# Altium footprint library Package_DFN_QFN.PcbLib: 735 footprints (part 28 of 46)
Each footprint in its own frame and in the unit in brackets; x right, y up, seen from the top. Pads: shape width x height; smd on the part's side, far side on the other; paste and mask are expansions set on the pad; w line width, h text height; cw(c..) or ccw(c..) is an arc to the next point about the centre after c.
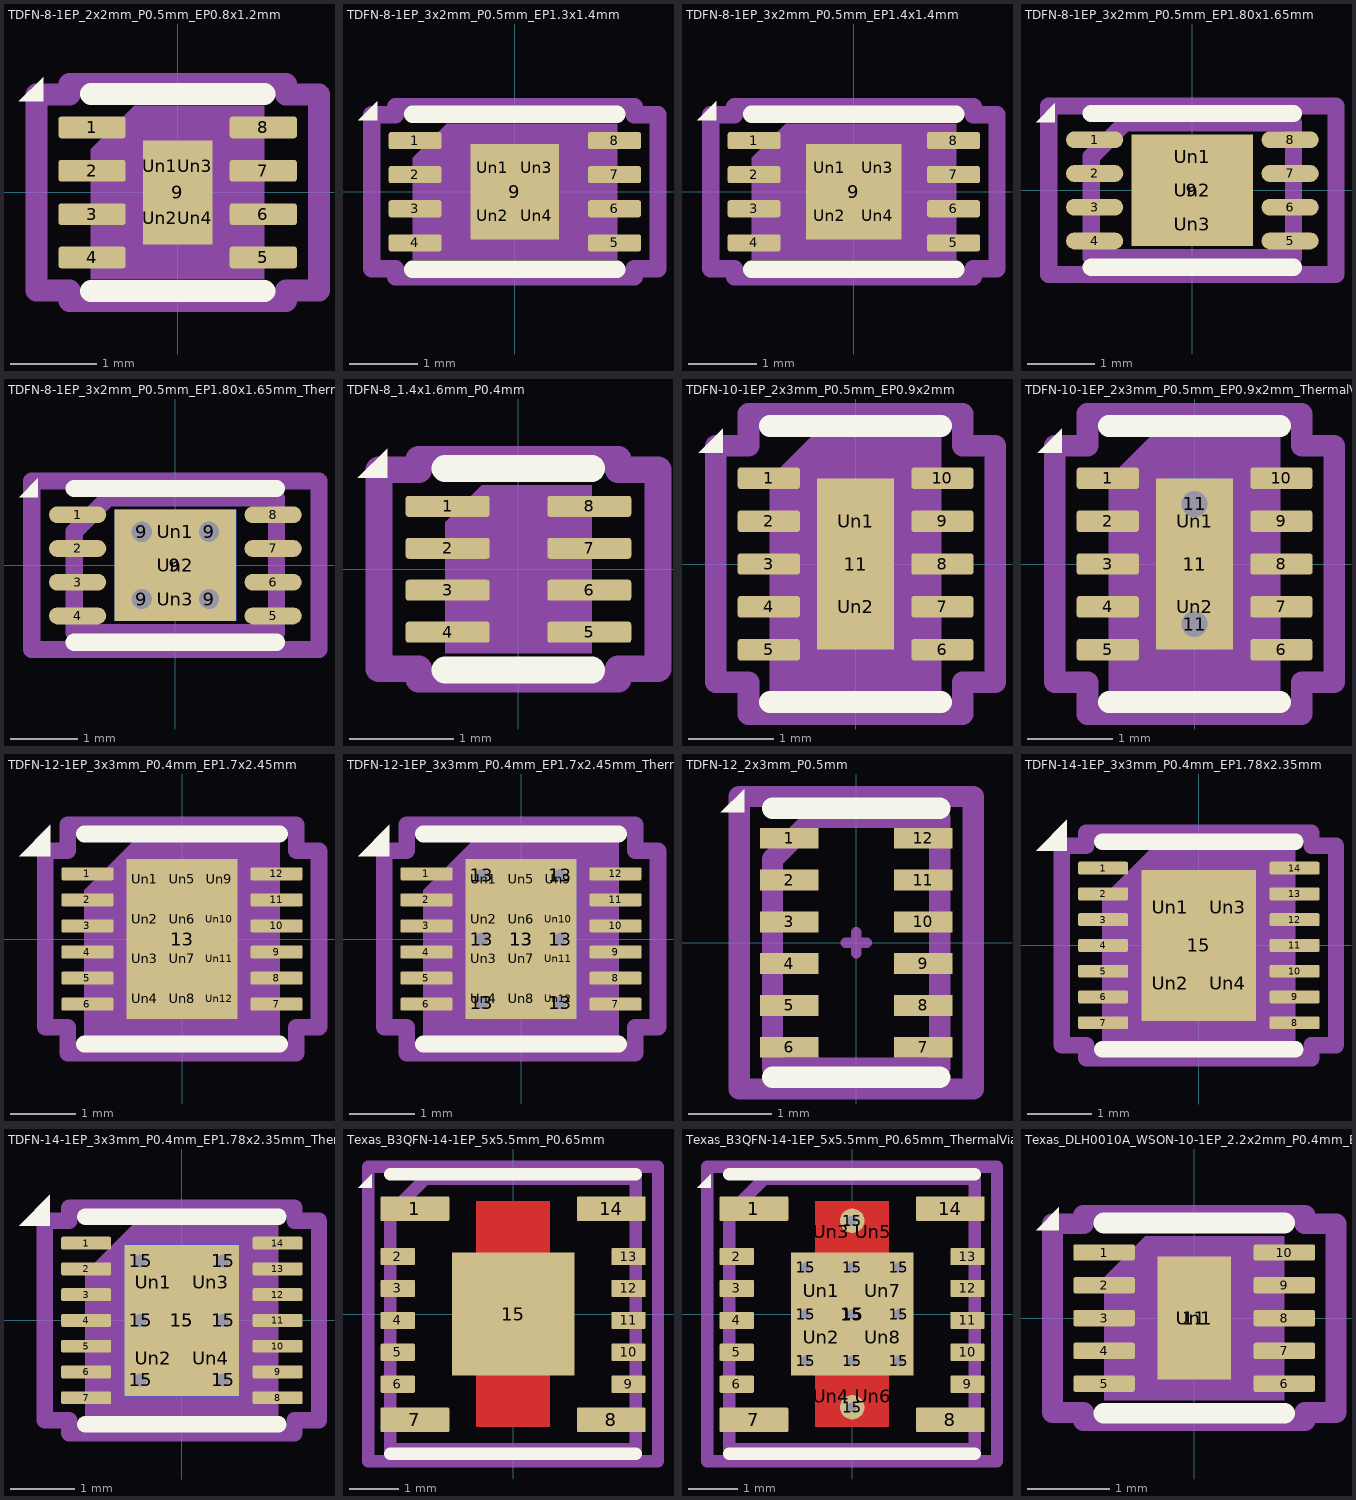
[diagram p27: the footprints below, top view; thin cyan lines are the x and y axes]

## TDFN-8-1EP_2x2mm_P0.5mm_EP0.8x1.2mm [mm] "TDFN-8-1EP_2x2mm_P0.5mm_EP0.8x1.2mm"
pads (13):
  rrect25% 0.775x0.25 smd: 1(-0.988,0.75) 2(-0.988,0.25) 3(-0.988,-0.25) 4(-0.988,-0.75) 5(0.988,-0.75) 6(0.988,-0.25) 7(0.988,0.25) 8(0.988,0.75)
  rect 0.8x1.2 smd: 9(0,0)
  rrect25% 0.32x0.48 on Top Paste: Un1(-0.2,0.3) Un2(-0.2,-0.3) Un3(0.2,0.3) Un4(0.2,-0.3)
F.SilkS:
  region: -1.55,1.05 -1.83,1.05 -1.55,1.33
  lines w0.254: -1,-1.135 1,-1.135 ; -1,1.135 1,1.135
Top Component Center:
  lines w0.127: -0.127,0 0.127,0 -0.127,0 ; 0,-0.127 0,0.127 0,-0.127
Top Assembly:
  region: 1,-1 -1,-1 -1,0.5 -0.5,1 1,1
Top Courtyard:
  lines w0.254: -1.63,-1.13 -1.63,1.13 -1.25,1.13 -1.25,1.25 1.25,1.25 1.25,1.13 1.63,1.13 1.63,-1.13 1.25,-1.13 1.25,-1.25 -1.25,-1.25 -1.25,-1.13 -1.63,-1.13
Top Designator:
  text ".Designator" at -2.251,-0.226 h1

## TDFN-8-1EP_3x2mm_P0.5mm_EP1.3x1.4mm [mm] "TDFN-8-1EP_3x2mm_P0.5mm_EP1.3x1.4mm"
pads (13):
  rrect25% 0.775x0.25 smd: 1(-1.462,0.75) 2(-1.462,0.25) 3(-1.462,-0.25) 4(-1.462,-0.75) 5(1.462,-0.75) 6(1.462,-0.25) 7(1.462,0.25) 8(1.462,0.75)
  rect 1.3x1.4 smd: 9(0,0)
  rrect25% 0.52x0.56 on Top Paste: Un1(-0.325,0.35) Un2(-0.325,-0.35) Un3(0.325,0.35) Un4(0.325,-0.35)
F.SilkS:
  region: -2.02,1.05 -2.3,1.05 -2.02,1.33
  lines w0.254: -1.5,-1.135 1.5,-1.135 ; -1.5,1.135 1.5,1.135
Top Component Center:
  lines w0.127: -0.127,0 0.127,0 -0.127,0 ; 0,-0.127 0,0.127 0,-0.127
Top Assembly:
  region: 1.5,-1 -1.5,-1 -1.5,0.5 -1,1 1.5,1
Top Courtyard:
  lines w0.254: -2.1,-1.13 -2.1,1.13 -1.75,1.13 -1.75,1.25 1.75,1.25 1.75,1.13 2.1,1.13 2.1,-1.13 1.75,-1.13 1.75,-1.25 -1.75,-1.25 -1.75,-1.13 -2.1,-1.13
Top Designator:
  text ".Designator" at -3.43,-0.344 h1.52

## TDFN-8-1EP_3x2mm_P0.5mm_EP1.4x1.4mm [mm] "TDFN-8-1EP_3x2mm_P0.5mm_EP1.4x1.4mm"
pads (13):
  rrect25% 0.775x0.25 smd: 1(-1.462,0.75) 2(-1.462,0.25) 3(-1.462,-0.25) 4(-1.462,-0.75) 5(1.462,-0.75) 6(1.462,-0.25) 7(1.462,0.25) 8(1.462,0.75)
  rect 1.4x1.4 smd: 9(0,0)
  rrect25% 0.56x0.56 on Top Paste: Un1(-0.35,0.35) Un2(-0.35,-0.35) Un3(0.35,0.35) Un4(0.35,-0.35)
F.SilkS:
  region: -2.02,1.05 -2.3,1.05 -2.02,1.33
  lines w0.254: -1.5,-1.135 1.5,-1.135 ; -1.5,1.135 1.5,1.135
Top Component Center:
  lines w0.127: -0.127,0 0.127,0 -0.127,0 ; 0,-0.127 0,0.127 0,-0.127
Top Assembly:
  region: 1.5,-1 -1.5,-1 -1.5,0.5 -1,1 1.5,1
Top Courtyard:
  lines w0.254: -2.1,-1.13 -1.75,-1.13 -1.75,-1.25 1.75,-1.25 1.75,-1.13 2.1,-1.13 2.1,1.13 1.75,1.13 1.75,1.25 -1.75,1.25 -1.75,1.13 -2.1,1.13 -2.1,-1.13
Top Designator:
  text ".Designator" at -3.43,-0.344 h1.52

## TDFN-8-1EP_3x2mm_P0.5mm_EP1.80x1.65mm [mm] "TDFN-8-1EP_3x2mm_P0.5mm_EP1.80x1.65mm"
pads (12):
  rrect100% 0.85x0.25 smd: 1(-1.45,0.75) 2(-1.45,0.25) 3(-1.45,-0.25) 4(-1.45,-0.75) 5(1.45,-0.75) 6(1.45,-0.25) 7(1.45,0.25) 8(1.45,0.75)
  rect 1.8x1.65 smd: 9(0,0)
  rect 0.7x0.65 on Top Paste: Un1(0,0.5) Un3(0,-0.5)
  rect 1.8x0.7 on Top Paste: Un2(0,0)
F.SilkS:
  region: -2.04,1.01 -2.32,1.01 -2.04,1.29
  lines w0.254: -1.5,-1.14 1.5,-1.14 ; -1.5,1.14 1.5,1.14
Top Component Center:
  lines w0.127: -0.127,0 0.127,0 -0.127,0 ; 0,-0.127 0,0.127 0,-0.127
Top Assembly:
  lines w0.254: -1.5,-1 1.5,-1 1.5,1 -1,1 -1.5,0.5 -1.5,-1
Top Courtyard:
  lines w0.254: -2.13,-1.25 2.13,-1.25 2.13,1.25 -2.13,1.25 -2.13,-1.25
Top Designator:
  text ".Designator" at -3.43,-0.344 h1.52

## TDFN-8-1EP_3x2mm_P0.5mm_EP1.80x1.65mm_ThermalVias [mm] "TDFN-8-1EP_3x2mm_P0.5mm_EP1.80x1.65mm_ThermalVias"
pads (17):
  rrect100% 0.85x0.25 smd: 1(-1.45,0.75) 2(-1.45,0.25) 3(-1.45,-0.25) 4(-1.45,-0.75) 5(1.45,-0.75) 6(1.45,-0.25) 7(1.45,0.25) 8(1.45,0.75)
  round 0.65 hole 0.3: 9(-0.5,-0.5) 9(-0.5,0.5) 9(0.5,-0.5) 9(0.5,0.5)
  rect 1.8x1.65 smd: 9(0,0)
  rect 1.8x1.65 smd far side: 9(0,0)
  rect 0.7x0.65 on Top Paste: Un1(0,0.5) Un3(0,-0.5)
  rect 1.8x0.7 on Top Paste: Un2(0,0)
F.SilkS:
  region: -2.04,1.01 -2.32,1.01 -2.04,1.29
  lines w0.254: -1.5,-1.14 1.5,-1.14 ; -1.5,1.14 1.5,1.14
Top Component Center:
  lines w0.127: -0.127,0 0.127,0 -0.127,0 ; 0,-0.127 0,0.127 0,-0.127
Top Assembly:
  lines w0.254: -1.5,-1 1.5,-1 1.5,1 -1,1 -1.5,0.5 -1.5,-1
Top Courtyard:
  lines w0.254: -2.13,-1.25 2.13,-1.25 2.13,1.25 -2.13,1.25 -2.13,-1.25
Top Designator:
  text ".Designator" at -3.43,-0.344 h1.52

## TDFN-8_1.4x1.6mm_P0.4mm [mm] "TDFN-8_1.4x1.6mm_P0.4mm"
pads (8):
  rrect25% 0.8x0.2 smd: 1(-0.675,0.6) 2(-0.675,0.2) 3(-0.675,-0.2) 4(-0.675,-0.6) 5(0.675,-0.6) 6(0.675,-0.2) 7(0.675,0.2) 8(0.675,0.6)
F.SilkS:
  region: -1.25,0.87 -1.53,0.87 -1.25,1.15
  lines w0.254: -0.7,-0.96 0.7,-0.96 ; -0.7,0.96 0.7,0.96
Top Component Center:
  lines w0.127: -0.127,0 0.127,0 -0.127,0 ; 0,-0.127 0,0.127 0,-0.127
Top Assembly:
  region: 0.7,-0.8 -0.7,-0.8 -0.7,0.45 -0.35,0.8 0.7,0.8
Top Courtyard:
  lines w0.254: -1.33,-0.95 -0.95,-0.95 -0.95,-1.05 0.95,-1.05 0.95,-0.95 1.33,-0.95 1.33,0.95 0.95,0.95 0.95,1.05 -0.95,1.05 -0.95,0.95 -1.33,0.95 -1.33,-0.95
Top Designator:
  text ".Designator" at -2.251,-0.226 h1
3D body "TDFN-8_1.4x1.6mm_P0.4mm.step": height 0.39, standoff 0, extent -0.79,-0.7 0.79,0.7

## TDFN-10-1EP_2x3mm_P0.5mm_EP0.9x2mm [mm] "TDFN-10-1EP_2x3mm_P0.5mm_EP0.9x2mm"
pads (13):
  rrect25% 0.725x0.25 smd: 1(-1.012,1) 2(-1.012,0.5) 3(-1.012,0) 4(-1.012,-0.5) 5(-1.012,-1) 6(1.012,-1) 7(1.012,-0.5) 8(1.012,0) 9(1.012,0.5) 10(1.012,1)
  rect 0.9x2 smd: 11(0,0)
  rrect25% 0.73x0.81 on Top Paste: Un1(0,0.5) Un2(0,-0.5)
F.SilkS:
  region: -1.55,1.3 -1.83,1.3 -1.55,1.58
  lines w0.254: -1,-1.61 1,-1.61 ; -1,1.61 1,1.61
Top Component Center:
  lines w0.127: -0.127,0 0.127,0 -0.127,0 ; 0,-0.127 0,0.127 0,-0.127
Top Assembly:
  region: 1,-1.5 -1,-1.5 -1,1 -0.5,1.5 1,1.5
Top Courtyard:
  lines w0.254: -1.63,-1.38 -1.25,-1.38 -1.25,-1.75 1.25,-1.75 1.25,-1.38 1.63,-1.38 1.63,1.38 1.25,1.38 1.25,1.75 -1.25,1.75 -1.25,1.38 -1.63,1.38 -1.63,-1.38
Top Designator:
  text ".Designator" at -2.251,-0.226 h1

## TDFN-10-1EP_2x3mm_P0.5mm_EP0.9x2mm_ThermalVias [mm] "TDFN-10-1EP_2x3mm_P0.5mm_EP0.9x2mm_ThermalVias"
pads (16):
  rrect25% 0.725x0.25 smd: 1(-1.012,1) 2(-1.012,0.5) 3(-1.012,0) 4(-1.012,-0.5) 5(-1.012,-1) 6(1.012,-1) 7(1.012,-0.5) 8(1.012,0) 9(1.012,0.5) 10(1.012,1)
  round 0.6 hole 0.3: 11(0,-0.7) 11(0,0.7)
  rect 0.9x2 smd: 11(0,0)
  rect 0.6x2 smd far side: 11(0,0)
  rrect25% 0.73x0.81 on Top Paste: Un1(0,0.5) Un2(0,-0.5)
F.SilkS:
  region: -1.55,1.3 -1.83,1.3 -1.55,1.58
  lines w0.254: -1,-1.61 1,-1.61 ; -1,1.61 1,1.61
Top Component Center:
  lines w0.127: -0.127,0 0.127,0 -0.127,0 ; 0,-0.127 0,0.127 0,-0.127
Top Assembly:
  region: 1,-1.5 -1,-1.5 -1,1 -0.5,1.5 1,1.5
Top Courtyard:
  lines w0.254: -1.63,-1.38 -1.25,-1.38 -1.25,-1.75 1.25,-1.75 1.25,-1.38 1.63,-1.38 1.63,1.38 1.25,1.38 1.25,1.75 -1.25,1.75 -1.25,1.38 -1.63,1.38 -1.63,-1.38
Top Designator:
  text ".Designator" at -2.251,-0.226 h1

## TDFN-12-1EP_3x3mm_P0.4mm_EP1.7x2.45mm [mm] "TDFN-12-1EP_3x3mm_P0.4mm_EP1.7x2.45mm"
pads (25):
  rrect25% 0.8x0.2 smd: 1(-1.45,1) 2(-1.45,0.6) 3(-1.45,0.2) 4(-1.45,-0.2) 5(-1.45,-0.6) 6(-1.45,-1) 7(1.45,-1) 8(1.45,-0.6) 9(1.45,-0.2) 10(1.45,0.2) 11(1.45,0.6) 12(1.45,1)
  rect 1.7x2.45 smd: 13(0,0)
  rrect25% 0.46x0.49 on Top Paste: Un1(-0.57,0.915) Un2(-0.57,0.305) Un3(-0.57,-0.305) Un4(-0.57,-0.915) Un5(0,0.915) Un6(0,0.305) Un7(0,-0.305) Un8(0,-0.915) Un9(0.57,0.915) Un10(0.57,0.305) Un11(0.57,-0.305) Un12(0.57,-0.915)
F.SilkS:
  region: -2.02,1.27 -2.5,1.27 -2.02,1.75
  lines w0.254: -1.5,-1.61 1.5,-1.61 ; -1.5,1.61 1.5,1.61
Top Component Center:
  lines w0.127: -0.127,0 0.127,0 -0.127,0 ; 0,-0.127 0,0.127 0,-0.127
Top Assembly:
  region: 1.5,-1.5 -1.5,-1.5 -1.5,0.75 -0.75,1.5 1.5,1.5
Top Courtyard:
  lines w0.254: -2.1,-1.35 -1.75,-1.35 -1.75,-1.75 1.75,-1.75 1.75,-1.35 2.1,-1.35 2.1,1.35 1.75,1.35 1.75,1.75 -1.75,1.75 -1.75,1.35 -2.1,1.35 -2.1,-1.35
Top Designator:
  text ".Designator" at -3.43,-0.344 h1.52

## TDFN-12-1EP_3x3mm_P0.4mm_EP1.7x2.45mm_ThermalVias [mm] "TDFN-12-1EP_3x3mm_P0.4mm_EP1.7x2.45mm_ThermalVias"
pads (32):
  rrect25% 0.8x0.2 smd: 1(-1.45,1) 2(-1.45,0.6) 3(-1.45,0.2) 4(-1.45,-0.2) 5(-1.45,-0.6) 6(-1.45,-1) 7(1.45,-1) 8(1.45,-0.6) 9(1.45,-0.2) 10(1.45,0.2) 11(1.45,0.6) 12(1.45,1)
  round 0.5 hole 0.2: 13(-0.6,-0.975) 13(-0.6,0) 13(-0.6,0.975) 13(0.6,-0.975) 13(0.6,0) 13(0.6,0.975)
  rect 1.7x2.45 smd: 13(0,0)
  rect 1.7x2.45 smd far side: 13(0,0)
  rrect25% 0.46x0.49 on Top Paste: Un1(-0.57,0.915) Un2(-0.57,0.305) Un3(-0.57,-0.305) Un4(-0.57,-0.915) Un5(0,0.915) Un6(0,0.305) Un7(0,-0.305) Un8(0,-0.915) Un9(0.57,0.915) Un10(0.57,0.305) Un11(0.57,-0.305) Un12(0.57,-0.915)
F.SilkS:
  region: -2.02,1.27 -2.5,1.27 -2.02,1.75
  lines w0.254: -1.5,-1.61 1.5,-1.61 ; -1.5,1.61 1.5,1.61
Top Component Center:
  lines w0.127: -0.127,0 0.127,0 -0.127,0 ; 0,-0.127 0,0.127 0,-0.127
Top Assembly:
  region: 1.5,-1.5 -1.5,-1.5 -1.5,0.75 -0.75,1.5 1.5,1.5
Top Courtyard:
  lines w0.254: -2.1,-1.35 -2.1,1.35 -1.75,1.35 -1.75,1.75 1.75,1.75 1.75,1.35 2.1,1.35 2.1,-1.35 1.75,-1.35 1.75,-1.75 -1.75,-1.75 -1.75,-1.35 -2.1,-1.35
Top Designator:
  text ".Designator" at -3.43,-0.344 h1.52

## TDFN-12_2x3mm_P0.5mm [mm] "TDFN-12_2x3mm_P0.5mm"
pads (12):
  rect 0.7x0.25 smd: 1(-0.8,1.25) 2(-0.8,0.75) 3(-0.8,0.25) 4(-0.8,-0.25) 5(-0.8,-0.75) 6(-0.8,-1.25) 7(0.8,-1.25) 8(0.8,-0.75) 9(0.8,-0.25) 10(0.8,0.25) 11(0.8,0.75) 12(0.8,1.25)
F.SilkS:
  region: -1.34,1.56 -1.62,1.56 -1.34,1.84
  lines w0.254: -1,-1.61 1,-1.61 ; -1,1.61 1,1.61
Top Component Center:
  lines w0.127: -0.127,0 0.127,0 -0.127,0 ; 0,-0.127 0,0.127 0,-0.127
Top Assembly:
  lines w0.254: -1,-1.5 1,-1.5 1,1.5 -0.5,1.5 -1,1 -1,-1.5
Top Courtyard:
  lines w0.254: -1.4,-1.75 1.4,-1.75 1.4,1.75 -1.4,1.75 -1.4,-1.75
Top Designator:
  text ".Designator" at -3.43,-0.344 h1.52

## TDFN-14-1EP_3x3mm_P0.4mm_EP1.78x2.35mm [mm] "TDFN-14-1EP_3x3mm_P0.4mm_EP1.78x2.35mm"
pads (19):
  rrect25% 0.775x0.2 smd: 1(-1.488,1.2) 2(-1.488,0.8) 3(-1.488,0.4) 4(-1.488,0) 5(-1.488,-0.4) 6(-1.488,-0.8) 7(-1.488,-1.2) 8(1.488,-1.2) 9(1.488,-0.8) 10(1.488,-0.4) 11(1.488,0) 12(1.488,0.4) 13(1.488,0.8) 14(1.488,1.2)
  rect 1.78x2.35 smd: 15(0,0)
  rrect25% 0.72x0.95 on Top Paste: Un1(-0.445,0.59) Un2(-0.445,-0.59) Un3(0.445,0.59) Un4(0.445,-0.59)
F.SilkS:
  region: -2.05,1.47 -2.53,1.47 -2.05,1.95
  lines w0.254: -1.5,-1.61 1.5,-1.61 ; -1.5,1.61 1.5,1.61
Top Component Center:
  lines w0.127: -0.127,0 0.127,0 -0.127,0 ; 0,-0.127 0,0.127 0,-0.127
Top Assembly:
  region: 1.5,-1.5 -1.5,-1.5 -1.5,0.75 -0.75,1.5 1.5,1.5
Top Courtyard:
  lines w0.254: -2.13,-1.55 -1.75,-1.55 -1.75,-1.75 1.75,-1.75 1.75,-1.55 2.13,-1.55 2.13,1.55 1.75,1.55 1.75,1.75 -1.75,1.75 -1.75,1.55 -2.13,1.55 -2.13,-1.55
Top Designator:
  text ".Designator" at -3.43,-0.344 h1.52

## TDFN-14-1EP_3x3mm_P0.4mm_EP1.78x2.35mm_ThermalVias [mm] "TDFN-14-1EP_3x3mm_P0.4mm_EP1.78x2.35mm_ThermalVias"
pads (26):
  rrect25% 0.775x0.2 smd: 1(-1.488,1.2) 2(-1.488,0.8) 3(-1.488,0.4) 4(-1.488,0) 5(-1.488,-0.4) 6(-1.488,-0.8) 7(-1.488,-1.2) 8(1.488,-1.2) 9(1.488,-0.8) 10(1.488,-0.4) 11(1.488,0) 12(1.488,0.4) 13(1.488,0.8) 14(1.488,1.2)
  round 0.5 hole 0.2: 15(-0.64,-0.925) 15(-0.64,0) 15(-0.64,0.925) 15(0.64,-0.925) 15(0.64,0) 15(0.64,0.925)
  rect 1.78x2.35 smd: 15(0,0)
  rect 1.78x2.35 smd far side: 15(0,0)
  rrect25% 0.77x1.02 on Top Paste: Un1(-0.445,0.59) Un2(-0.445,-0.59) Un3(0.445,0.59) Un4(0.445,-0.59)
F.SilkS:
  region: -2.05,1.47 -2.53,1.47 -2.05,1.95
  lines w0.254: -1.5,-1.61 1.5,-1.61 ; -1.5,1.61 1.5,1.61
Top Component Center:
  lines w0.127: -0.127,0 0.127,0 -0.127,0 ; 0,-0.127 0,0.127 0,-0.127
Top Assembly:
  region: 1.5,-1.5 -1.5,-1.5 -1.5,0.75 -0.75,1.5 1.5,1.5
Top Courtyard:
  lines w0.254: -2.13,-1.55 -1.75,-1.55 -1.75,-1.75 1.75,-1.75 1.75,-1.55 2.13,-1.55 2.13,1.55 1.75,1.55 1.75,1.75 -1.75,1.75 -1.75,1.55 -2.13,1.55 -2.13,-1.55
Top Designator:
  text ".Designator" at -3.43,-0.344 h1.52

## Texas_B3QFN-14-1EP_5x5.5mm_P0.65mm [mm] "Texas_B3QFN-14-1EP_5x5.5mm_P0.65mm"
pads (15):
  rrect10% 1.4x0.5 smd: 1(-2,2.145) 7(-2,-2.155) 8(2,-2.155) 14(2,2.145)
  rrect14% 0.7x0.35 smd: 2(-2.35,1.17) 3(-2.35,0.52) 4(-2.35,-0.13) 5(-2.35,-0.78) 6(-2.35,-1.43) 9(2.35,-1.43) 10(2.35,-0.78) 11(2.35,-0.13) 12(2.35,0.52) 13(2.35,1.17)
  rect 2.5x2.5 smd: 15(0,0)
F.Cu:
  region: 0.75,-2.3 -0.75,-2.3 -0.75,-1.25 0.75,-1.25
  region: 0.75,1.25 -0.75,1.25 -0.75,2.3 0.75,2.3
F.SilkS:
  region: -2.88,2.57 -3.16,2.57 -2.88,2.85
  lines w0.254: -2.5,-2.85 2.5,-2.85 ; -2.5,2.85 2.5,2.85
F.Paste:
  region: 0.75,-2.3 -0.75,-2.3 -0.75,-1.25 0.75,-1.25
  region: 0.75,1.25 -0.75,1.25 -0.75,2.3 0.75,2.3
F.Mask:
  region: 0.75,-2.3 -0.75,-2.3 -0.75,-1.25 0.75,-1.25
  region: 0.75,1.25 -0.75,1.25 -0.75,2.3 0.75,2.3
Top Component Center:
  lines w0.127: -0.127,0 0.127,0 -0.127,0 ; 0,-0.127 0,0.127 0,-0.127
Top Assembly:
  lines w0.254: -2.5,-2.75 2.5,-2.75 2.5,2.75 -1.8,2.75 -2.5,2.05 -2.5,-2.75
Top Courtyard:
  lines w0.254: -2.95,-3 2.95,-3 2.95,3 -2.95,3 -2.95,-3
Top Designator:
  text ".Designator" at -3.43,-0.344 h1.52

## Texas_B3QFN-14-1EP_5x5.5mm_P0.65mm_ThermalVia [mm] "Texas_B3QFN-14-1EP_5x5.5mm_P0.65mm_ThermalVia"
pads (34):
  rrect10% 1.4x0.5 smd: 1(-2,2.145) 7(-2,-2.155) 8(2,-2.155) 14(2,2.145)
  rrect14% 0.7x0.35 smd: 2(-2.35,1.17) 3(-2.35,0.52) 4(-2.35,-0.13) 5(-2.35,-0.78) 6(-2.35,-1.43) 9(2.35,-1.43) 10(2.35,-0.78) 11(2.35,-0.13) 12(2.35,0.52) 13(2.35,1.17)
  round 0.5 hole 0.2: 15(-0.95,-0.95) 15(-0.95,0) 15(-0.95,0.95) 15(0,-1.9) 15(0,-0.95) 15(0,0) 15(0,0.95) 15(0,1.9) 15(0.95,-0.95) 15(0.95,0) 15(0.95,0.95)
  rect 2.5x2.5 smd: 15(0,0)
  rrect8% 0.95x0.65 on Top Paste: Un1(-0.625,0.475) Un2(-0.625,-0.475) Un7(0.625,0.475) Un8(0.625,-0.475)
  rrect8% 0.6x1.15 on Top Paste: Un3(-0.425,1.675) Un4(-0.425,-1.675) Un5(0.425,1.675) Un6(0.425,-1.675)
F.Cu:
  region: 0.75,-2.3 -0.75,-2.3 -0.75,-1.25 0.75,-1.25
  region: 0.75,1.25 -0.75,1.25 -0.75,2.3 0.75,2.3
F.SilkS:
  region: -2.88,2.57 -3.16,2.57 -2.88,2.85
  lines w0.254: -2.5,-2.85 2.5,-2.85 ; -2.5,2.85 2.5,2.85
F.Mask:
  region: 0.75,-2.3 -0.75,-2.3 -0.75,-1.25 0.75,-1.25
  region: 0.75,1.25 -0.75,1.25 -0.75,2.3 0.75,2.3
Top Component Center:
  lines w0.127: -0.127,0 0.127,0 -0.127,0 ; 0,-0.127 0,0.127 0,-0.127
Top Assembly:
  lines w0.254: -2.5,-2.75 2.5,-2.75 2.5,2.75 -1.8,2.75 -2.5,2.05 -2.5,-2.75
Top Courtyard:
  lines w0.254: -2.95,-3 2.95,-3 2.95,3 -2.95,3 -2.95,-3
Top Designator:
  text ".Designator" at -3.43,-0.344 h1.52

## Texas_DLH0010A_WSON-10-1EP_2.2x2mm_P0.4mm_EP0.9x1.5mm [mm] "Texas_DLH0010A_WSON-10-1EP_2.2x2mm_P0.4mm_EP0.9x1.5mm"
pads (12):
  rrect25% 0.75x0.2 smd: 1(-1.1,0.8) 2(-1.1,0.4) 3(-1.1,0) 4(-1.1,-0.4) 5(-1.1,-0.8) 6(1.1,-0.8) 7(1.1,-0.4) 8(1.1,0) 9(1.1,0.4) 10(1.1,0.8)
  rect 0.9x1.5 smd: 11(0,0)
  rrect25% 0.84x1.41 on Top Paste: Un1(0,0)
F.SilkS:
  region: -1.65,1.07 -1.93,1.07 -1.65,1.35
  lines w0.254: -1.1,-1.16 1.1,-1.16 ; -1.1,1.16 1.1,1.16
Top Component Center:
  lines w0.127: -0.127,0 0.127,0 -0.127,0 ; 0,-0.127 0,0.127 0,-0.127
Top Assembly:
  region: 1.1,-1 -1.1,-1 -1.1,0.5 -0.6,1 1.1,1
Top Courtyard:
  lines w0.254: -1.73,-1.15 -1.73,1.15 -1.35,1.15 -1.35,1.25 1.35,1.25 1.35,1.15 1.73,1.15 1.73,-1.15 1.35,-1.15 1.35,-1.25 -1.35,-1.25 -1.35,-1.15 -1.73,-1.15
Top Designator:
  text ".Designator" at -3.43,-0.344 h1.52
3D body "Texas_DLH0010A_WSON-10-1EP_2.2x2mm_P0.4mm_EP0.9x1.5mm.step": height 0.8, standoff 0, extent -1.1,-0.988 1.1,0.988